# Altium schematic symbol library MY_LIB_IC_IEC.SchLib: 9 symbols
Pins are listed as number, name and electrical type; pins without a type are passive.

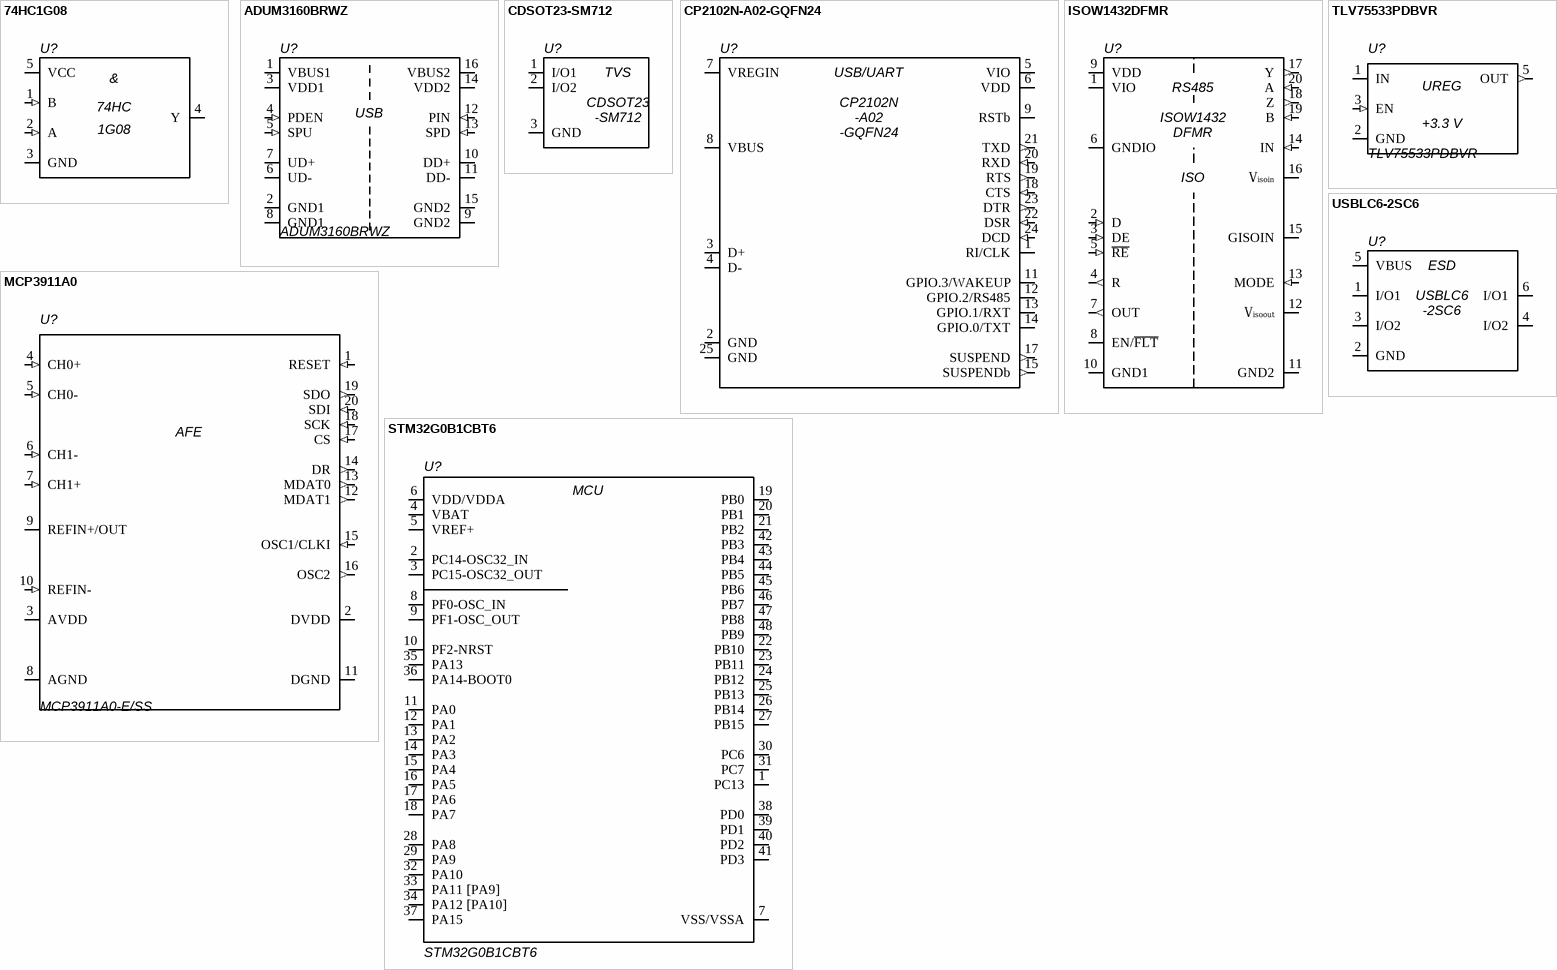
[diagram p0: symbols 74HC1G08 to USBLC6-2SC6]

## 74HC1G08
designator U?  (value not drawn)
Single 2-input AND gate, TSSOP5 (SOT353-1); VCC 2.0-6.0 V; pin1=B, pin2=A, pin3=GND, pin4=Y, pin5=VCC
pins: 1 B (in), 2 A (in), 3 GND (power), 4 Y (io), 5 VCC (power)
text: &; 74HC; 1G08

## ADUM3160BRWZ
designator U?
Full/low speed USB digital isolator; SOIC-16 wide (RW-16)
pins: 1 VBUS1 (power), 2 GND1 (power), 3 VDD1 (power), 4 PDEN (in), 5 SPU (in), 6 UD- (io), 7 UD+ (io), 8 GND1 (power), 9 GND2 (power), 10 DD+ (io), 11 DD- (io), 12 PIN (in), 13 SPD (in), 14 VDD2 (power), 15 GND2 (power), 16 VBUS2 (power)
text: USB

## CDSOT23-SM712
designator U?  (value not drawn)
Two-line asymmetric TVS array for RS-485; SOT23; pins 1/2 line, 3 common; VRWM +12/-7 V relative to common
pins: 1 I/O1, 2 I/O2, 3 GND
text: TVS; CDSOT23; -SM712

## CP2102N-A02-GQFN24
designator U?  (value not drawn)
USB-to-UART bridge in QFN24. Exposed ground pad 25.
pins: 1 RI/CLK (io), 2 GND (power), 3 D+ (io), 4 D- (io), 5 VIO (power), 6 VDD (power), 7 VREGIN (power), 8 VBUS (power), 9 RSTb (io), 10 NC hidden, 11 GPIO.3/WAKEUP (io), 12 GPIO.2/RS485 (io), 13 GPIO.1/RXT (io), 14 GPIO.0/TXT (io), 15 SUSPENDb (out), 16 NC hidden, 17 SUSPEND (out), 18 CTS (in), 19 RTS (out), 20 RXD (in), 21 TXD (out), 22 DSR (in), 23 DTR (out), 24 DCD (in), 25 GND (power)
text: USB/UART; CP2102N; -A02; -GQFN24

## ISOW1432DFMR
designator U?  (value not drawn)
12-Mbps full-duplex isolated RS-485/RS-422 with isolated DC-DC; SOIC-20 DFM
pins: 1 VIO (power), 2 D (in), 3 DE (in), 4 R (out), 5 ~{RE} (in), 6 GNDIO (power), 7 OUT (out), 8 EN/~{FLT} (io), 9 VDD (power), 10 GND1 (power), 11 GND2 (power), 12 Vᵢₛₒₒᵤₜ (power), 13 MODE (in), 14 IN (in), 15 GISOIN (power), 16 Vᵢₛₒᵢₙ (power), 17 Y (out), 18 Z (out), 19 B (in), 20 A (in)
text: RS485; ISOW1432; DFMR; ISO

## MCP3911A0
designator U?, comment MCP3911A0-E/SS
Two-channel 16/24-bit delta-sigma ADC analog front end with SPI; SSOP-20; 2.7-3.6 V
pins: 1 RESET (in), 2 DVDD (power), 3 AVDD (power), 4 CH0+ (in), 5 CH0- (in), 6 CH1- (in), 7 CH1+ (in), 8 AGND (power), 9 REFIN+/OUT (io), 10 REFIN- (in), 11 DGND (power), 12 MDAT1 (out), 13 MDAT0 (out), 14 DR (out), 15 OSC1/CLKI (in), 16 OSC2 (out), 17 CS (in), 18 SCK (in), 19 SDO (out), 20 SDI (in)
text: AFE

## STM32G0B1CBT6
designator U?
Arm Cortex-M0+ microcontroller, 128 KB flash, LQFP-48
pins: 1 PC13 (io), 2 PC14-OSC32_IN (io), 3 PC15-OSC32_OUT (io), 4 VBAT (power), 5 VREF+ (io), 6 VDD/VDDA (power), 7 VSS/VSSA (power), 8 PF0-OSC_IN (io), 9 PF1-OSC_OUT (io), 10 PF2-NRST (io), 11 PA0 (io), 12 PA1 (io), 13 PA2 (io), 14 PA3 (io), 15 PA4 (io), 16 PA5 (io), 17 PA6 (io), 18 PA7 (io), 19 PB0 (io), 20 PB1 (io), 21 PB2 (io), 22 PB10 (io), 23 PB11 (io), 24 PB12 (io), 25 PB13 (io), 26 PB14 (io), 27 PB15 (io), 28 PA8 (io), 29 PA9 (io), 30 PC6 (io), 31 PC7 (io), 32 PA10 (io), 33 PA11 [PA9] (io), 34 PA12 [PA10] (io), 35 PA13 (io), 36 PA14-BOOT0 (io), 37 PA15 (io), 38 PD0 (io), 39 PD1 (io), 40 PD2 (io), 41 PD3 (io), 42 PB3 (io), 43 PB4 (io), 44 PB5 (io), 45 PB6 (io), 46 PB7 (io), 47 PB8 (io), 48 PB9 (io)
text: MCU

## TLV75533PDBVR
designator U?
3.3 V 500 mA fixed-output low-dropout regulator with enable; SOT-23-5 DBV
pins: 1 IN (power), 2 GND (power), 3 EN (in), 5 OUT (out)
text: UREG; +3.3 V

## USBLC6-2SC6
designator U?  (value not drawn)
Two-line low-capacitance ESD protection; SOT23-6L; I/O1 pins 1/6, I/O2 pins 3/4 internally common
pins: 1 I/O1, 2 GND, 3 I/O2, 4 I/O2, 5 VBUS, 6 I/O1
text: ESD; USBLC6; -2SC6